# Altium integrated library TR5.IntLib: 1 symbol
Pins are listed as number, name and electrical type; pins without a type are passive.

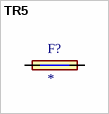
[diagram p0: symbol TR5]

## TR5
designator F?
Fixed Inductors 0603 0.56uH 20% 3.1A 0.045ohm; MF: Taiyo Yuden; MP: TR5; SnapEDA_Link: https://www.snapeda.com/parts/TR5/Taiyo+Yuden/view-part/?ref=snap; Package: None; Value: *; Check_prices: https://www.snapeda.com/parts/TR5/Taiyo+Yuden/view-part/?ref=eda
footprint TR5
pins: 1, 2